# Altium footprint library ECG_PCB.PcbLib: 33 footprints (part 1 of 3)
Each footprint in its own frame and in the unit in brackets; x right, y up, seen from the top. Pads: shape width x height; smd on the part's side, far side on the other; paste and mask are expansions set on the pad; w line width, h text height; cw(c..) or ccw(c..) is an arc to the next point about the centre after c.
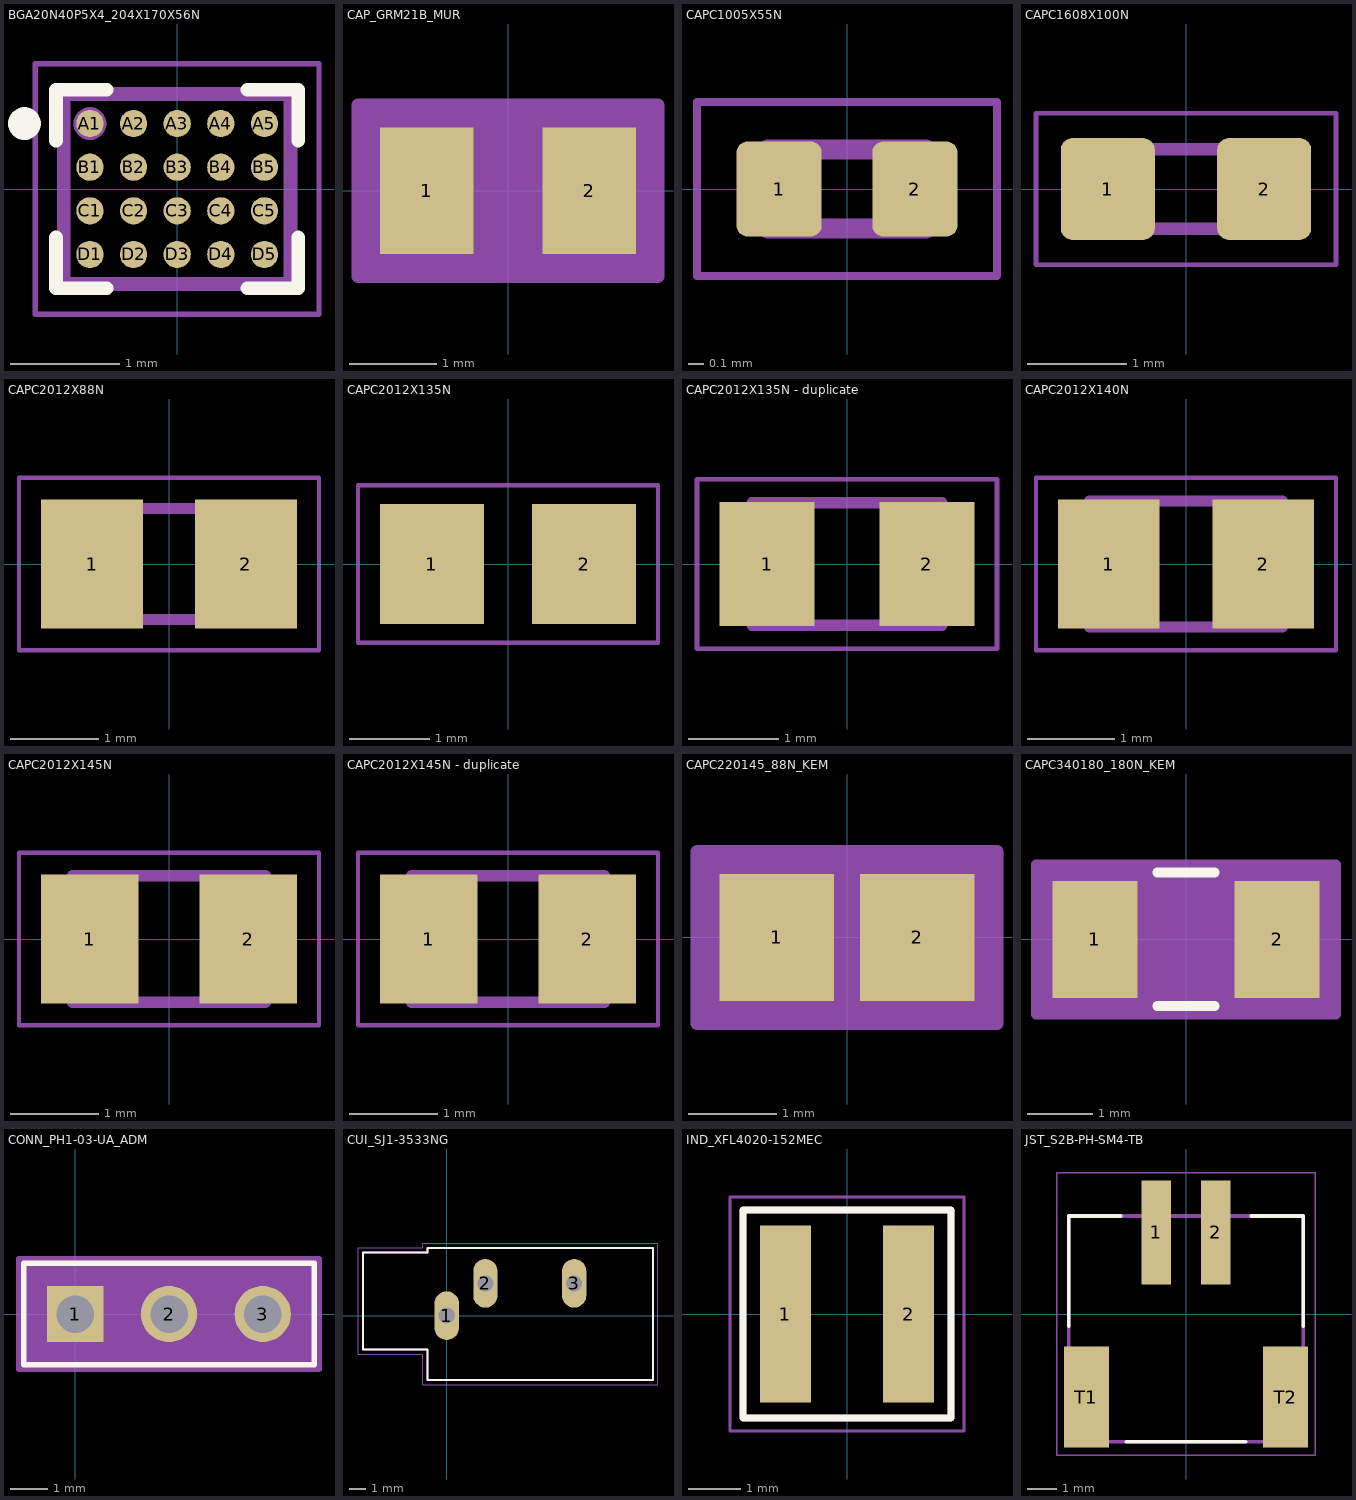
[diagram p0: the footprints below, top view; thin cyan lines are the x and y axes]

## BGA20N40P5X4_204X170X56N [mm]
pads (20):
  round 0.25 smd mask+0.102: A1(-0.8,0.6) A2(-0.4,0.6) A3(0,0.6) A4(0.4,0.6) A5(0.8,0.6) B1(-0.8,0.2) B2(-0.4,0.2) B3(0,0.2) B4(0.4,0.2) B5(0.8,0.2) C1(-0.8,-0.2) C2(-0.4,-0.2) C3(0,-0.2) C4(0.4,-0.2) C5(0.8,-0.2) D1(-0.8,-0.6) D2(-0.4,-0.6) D3(0,-0.6) D4(0.4,-0.6) D5(0.8,-0.6)
Top Overlay:
  circle w0.2: c-1.4,0.6 r0.05
  lines w0.127: -1.11,-0.445 -1.11,-0.91 -0.645,-0.91 ; -1.11,0.445 -1.11,0.91 -0.645,0.91 ; 0.645,-0.91 1.11,-0.91 1.11,-0.445 ; 0.645,0.91 1.11,0.91 1.11,0.445
Mechanical 13:
  circle w0.2: c-0.8,0.6 r0.05
  lines w0.127: -1.04,-0.87 1.04,-0.87 1.04,0.87 -1.04,0.87 -1.04,-0.87
Mechanical 15:
  lines w0.05: -1.3,-1.15 1.3,-1.15 1.3,1.15 -1.3,1.15 -1.3,-1.15
3D body "step_temp.STEP": height 0.56, standoff 0, extent -1.02,-0.853 1.02,0.853

## CAP_GRM21B_MUR [mil]
pads (2):
  rect 42x57 smd paste+0 mask+0: 1(-36.5,0) 2(36.5,0)
Mechanical 13:
  circle w1: c-31.5,0 r3
  lines w1: -43.5,-28.5 -43.5,28.5 ; -43.5,-28.5 43.5,-28.5 ; -43.5,-28.5 -15.5,-28.5 -15.5,28.5 -43.5,28.5 ; -43.5,-28.5 -43.5,28.5 ; -43.5,28.5 43.5,28.5 ; 43.5,-28.5 43.5,28.5 ; 43.5,-28.5 43.5,28.5 ; 43.5,-28.5 15.5,-28.5 15.5,28.5 43.5,28.5
Mechanical 15:
  region: 67.5,-37 -67.5,-37 -67.5,40 67.5,40
  lines w6: -67.5,-38.5 67.5,-38.5 67.5,38.5 -67.5,38.5 -67.5,-38.5
3D body "CAP_GRM21B_MUR.step": height 57.01, standoff 0, extent -43.5,-28.5 43.5,28.5

## CAPC1005X55N [mm]
height 0.55
pads (2):
  rrect25% 0.54x0.6 smd paste+0 mask+0.102: 1(-0.43,0) 2(0.43,0)
Mechanical 13:
  lines w0.127: -0.5,-0.25 -0.5,0.25 0.5,0.25 0.5,-0.25 -0.5,-0.25
Mechanical 15:
  lines w0.05: -0.95,-0.55 -0.95,0.55 0.95,0.55 0.95,-0.55 -0.95,-0.55

## CAPC1608X100N [mm]
height 1
pads (2):
  rrect25% 0.95x1.03 smd paste+0 mask+0.102: 1(-0.79,0) 2(0.79,0)
Mechanical 13:
  lines w0.127: -0.8,-0.4 0.8,-0.4 0.8,0.4 -0.8,0.4 -0.8,-0.4
Mechanical 15:
  lines w0.05: -1.515,-0.765 1.515,-0.765 1.515,0.765 -1.515,0.765 -1.515,-0.765
3D body "step_temp.STEP": height 1, standoff 0, extent -0.8,-0.4 0.8,0.4

## CAPC2012X88N [mm]
pads (2):
  rect 1.16x1.47 smd: 1(-0.875,0) 2(0.875,0)
Mechanical 13:
  lines w0.127: -1,-0.63 1,-0.63 1,0.63 -1,0.63 -1,-0.63
Mechanical 15:
  lines w0.05: -1.708,-0.983 1.708,-0.983 1.708,0.983 -1.708,0.983 -1.708,-0.983
3D body "step_temp.STEP": height 0.88, standoff 0, extent -1,-0.625 1,0.625

## CAPC2012X135N [mm]
pads (2):
  rect 1.3x1.5 smd mask+0.102: 1(-0.95,0)
  rect 1.3x1.5 smd: 2(0.95,0)
Mechanical 13:
  region: 1.106,-0.724 0.356,-0.724 0.356,0.726 1.106,0.726
  region: -0.342,-0.724 -1.092,-0.724 -1.092,0.726 -0.342,0.726
Mechanical 15:
  lines w0.051: -1.873,-0.983 -1.873,0.983 1.873,0.983 1.873,-0.983 -1.873,-0.983
3D body "step_temp.STEP": height 1.4, standoff 0, extent -1,-0.625 1,0.625

## CAPC2012X135N - duplicate [mm]
pads (2):
  rect 1.05x1.38 smd: 1(-0.888,0) 2(0.888,0)
Mechanical 13:
  lines w0.127: -1.05,-0.68 -1.05,0.68 1.05,0.68 1.05,-0.68 -1.05,-0.68
Mechanical 15:
  lines w0.05: -1.665,-0.94 -1.665,0.94 1.665,0.94 1.665,-0.94 -1.665,-0.94
3D body "step_temp.STEP": height 1.35, standoff 0, extent -1,-0.625 1,0.625

## CAPC2012X140N [mm]
pads (2):
  rect 1.16x1.47 smd: 1(-0.88,0) 2(0.88,0)
Mechanical 13:
  lines w0.127: -1.1,-0.72 1.1,-0.72 1.1,0.72 -1.1,0.72 -1.1,-0.72
Mechanical 15:
  lines w0.05: -1.713,-0.983 1.713,-0.983 1.713,0.983 -1.713,0.983 -1.713,-0.983
3D body "step_temp.STEP": height 1.4, standoff 0, extent -1.016,-0.635 1.016,0.635

## CAPC2012X145N [mm]
pads (2):
  rect 1.11x1.47 smd: 1(-0.9,0) 2(0.9,0)
Mechanical 13:
  lines w0.127: -1.1,-0.72 -1.1,0.72 1.1,0.72 1.1,-0.72 -1.1,-0.72
Mechanical 15:
  lines w0.05: -1.708,-0.983 -1.708,0.983 1.708,0.983 1.708,-0.983 -1.708,-0.983
3D body "step_temp.STEP": height 1.45, standoff 0, extent -1,-0.625 1,0.625

## CAPC2012X145N - duplicate [mm]
pads (2):
  rect 1.11x1.47 smd paste+0 mask+0.102: 1(-0.9,0) 2(0.9,0)
Mechanical 13:
  lines w0.127: -1.1,-0.72 -1.1,0.72 1.1,0.72 1.1,-0.72 -1.1,-0.72
Mechanical 15:
  lines w0.05: -1.708,-0.983 -1.708,0.983 1.708,0.983 1.708,-0.983 -1.708,-0.983
3D body "step_temp.STEP": height 1.45, standoff 0, extent -1,-0.625 1,0.625

## CAPC220145_88N_KEM [mm]
pads (2):
  rect 1.306x1.45 smd paste+0 mask+0: 1(-0.803,0) 2(0.803,0)
Mechanical 13:
  lines w0.025: -1.1,-0.725 -1.1,0.725 ; -1.1,-0.725 1.1,-0.725 ; -1.1,-0.725 -0.35,-0.725 -0.35,0.725 -1.1,0.725 ; -1.1,-0.725 -1.1,0.725 ; -1.1,0.725 1.1,0.725 ; 1.1,-0.725 1.1,0.725 ; 1.1,-0.725 1.1,0.725 ; 1.1,-0.725 0.35,-0.725 0.35,0.725 1.1,0.725
Mechanical 15:
  region: 1.71,-1.016 -1.71,-1.016 -1.71,0.942 1.71,0.942
  lines w0.152: -1.71,-0.979 1.71,-0.979 1.71,0.979 -1.71,0.979 -1.71,-0.979
3D body "CAPC220145_88N_KEM.step": height 0.88, standoff 0, extent -1.1,-0.725 1.1,0.725

## CAPC340180_180N_KEM [mm]
pads (2):
  rect 1.306x1.8 smd paste+0 mask+0: 1(-1.403,0) 2(1.403,0)
Top Overlay:
  lines w0.152: -0.442,-1.027 0.442,-1.027 ; -0.442,1.027 0.442,1.027
Mechanical 13:
  lines w0.025: -0.95,0.9 -0.95,-0.9 -1.7,-0.9 ; 0.95,0.9 0.95,-0.9 1.7,-0.9 ; -1.7,-0.9 -1.7,0.9 -1.7,-0.9 ; -1.7,-0.9 1.7,-0.9 ; 1.7,-0.9 1.7,0.9 1.7,-0.9
Mechanical 15:
  region: 2.31,-1.143 -2.31,-1.143 -2.31,1.165 2.31,1.165
  lines w0.152: -2.31,-1.154 2.31,-1.154 2.31,1.154 -2.31,1.154 -2.31,-1.154
3D body "CAPC340180_180N_KEM.step": height 1.8, standoff 0, extent -1.7,-0.9 1.7,0.9

## CONN_PH1-03-UA_ADM [mil]
pads (3):
  rect 60x60 hole 40 paste-99999 mask+0: 1(0,0)
  round 60 hole 40 paste-99999 mask+0: 2(100,0) 3(200,0)
Top Overlay:
  lines w6: -55,-54 255,-54 255,54 -55,54 -55,-54
Mechanical 13:
  circle w1: c0,-34 r10
  lines w1: -50,-49 250,-49 250,49 -50,49 -50,-49
Mechanical 15:
  region: 260,59 -60,59 -60,-59 260,-59
  lines w6: -60,-59 -60,59 260,59 260,-59 -60,-59
3D body "CONN_PH1-03-UA_ADM.step": height 335, standoff -200, extent -50,-49.02 250,49.02

## CUI_SJ1-3533NG [mm]
pads (3):
  oval 1.508x3.016 hole 1 square: 1(0,0) 2(2.4,2) 3(7.9,2)
Top Overlay:
  lines w0.127: -5.2,-2.1 -1.2,-2.1 -1.2,-4 12.8,-4 12.8,4.2 -1.2,4.2 -1.2,3.9 -5.2,3.9 -5.2,-2.1
Mechanical 13:
  lines w0.127: -5.2,-2.1 -1.2,-2.1 -1.2,-4 12.8,-4 12.8,4.2 -1.2,4.2 -1.2,3.9 -5.2,3.9 -5.2,-2.1
Mechanical 15:
  lines w0.05: -5.5,-2.4 -1.5,-2.4 -1.5,-4.3 13.1,-4.3 13.1,4.5 -1.5,4.5 -1.5,4.2 -5.5,4.2 -5.5,-2.4
3D body "step_temp.STEP": height 11.9, standoff -3.7, extent -5.215,-4.064 12.835,4.136

## IND_XFL4020-152MEC [mm]
height 2.1
pads (2):
  rect 0.98x3.4 smd: 1(-1.185,0) 2(1.185,0)
Top Overlay:
  lines w0.127: -2,-2 -2,2 2,2 2,-2 -2,-2
Mechanical 13:
  lines w0.127: -2,-2 2,-2 2,2 -2,2 -2,-2
Mechanical 15:
  lines w0.05: -2.25,-2.25 2.25,-2.25 2.25,2.25 -2.25,2.25 -2.25,-2.25
3D body "step_temp.STEP": height 2.1, standoff 0, extent -2,-2 2,2

## JST_S2B-PH-SM4-TB [mm]
height 5.5
pads (4):
  rect 1x3.5 smd paste+0 mask+0.102: 1(-1,2.75) 2(1,2.75)
  rect 1.5x3.4 smd paste+0 mask+0.102: T1(-3.35,-2.8) T2(3.35,-2.8)
Top Overlay:
  lines w0.127: -3.95,-0.4 -3.95,3.3 -2.2,3.3 ; -2,-4.3 2,-4.3 ; 2.2,3.3 3.95,3.3 3.95,-0.4
Mechanical 13:
  lines w0.127: -3.95,-4.3 -3.95,3.3 3.95,3.3 3.95,-4.3 -3.95,-4.3
Mechanical 15:
  lines w0.05: -4.35,-4.75 4.35,-4.75 4.35,4.75 -4.35,4.75 -4.35,-4.75
3D body "S2B-PH-SM4-TB--3DModel-STEP-269445.STEP": height 5.5, standoff -0.1, extent -3.963,-4.3 3.937,4.3